# Altium integrated library 1868076.IntLib: 1 symbol
Pins are listed as number, name and electrical type; pins without a type are passive.

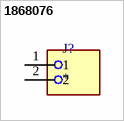
[diagram p0: symbol 1868076]

## 1868076
designator J?
PCB Terminal Screw 7.62mm 10AWG 630V 32A 2 Position COMBICON MKDS Series | Phoenix Contact 1868076; SnapEDA_Link: https://www.snapeda.com/parts/1868076/Phoenix+Contact/view-part/?ref=snap; Package: None; Value: *; MF: Phoenix Contact; MP: 1868076; Check_prices: https://www.snapeda.com/parts/1868076/Phoenix+Contact/view-part/?ref=eda
footprint PHOENIX_1868076
pins: 1, 2